# Altium schematic symbol library UPDI 6-pin header.SchLib: 1 symbol
Pins are listed as number, name and electrical type; pins without a type are passive.

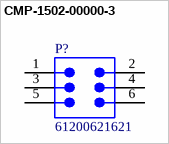
[diagram p0: symbol CMP-1502-00000-3]

## CMP-1502-00000-3
designator P?, comment 61200621621
Conn Shrouded Header (4 Sides) M 6 POS 2.54mm Solder ST Top Entry Thru-Hole Tray; Operating Supply Voltage: 250V; Connector Type: Male Pin; Gender: Male; Insulation Resistance: 1GΩ; Number of Contacts: 6; Current Rating: 3A; Contact Resistance: 20mΩ; RoHS: Compliant; Contact Material: Copper; Row Spacing: 2.54mm; Color: Black; Contact Plating: Gold; Termination: Solder; Number of Pins: 6; Number of Rows: 2; Min Operating Temperature: -40°C; Max Operating Temperature: 105°C; Mount: Through Hole; Lead Pitch: 2.54mm; Number of Positions: 6; Pitch: 2.54mm; Insulation Material: PBT; Orientation: Vertical; Length: 15.28mm
footprint 61200621621 (6 pins, straight, gold plating)
pins: 1, 2, 3, 4, 5, 6